# Altium schematic symbol library Capacitor.SchLib: 735 symbols (part 1 of 20)
Pins are listed as number, name and electrical type; pins without a type are passive.

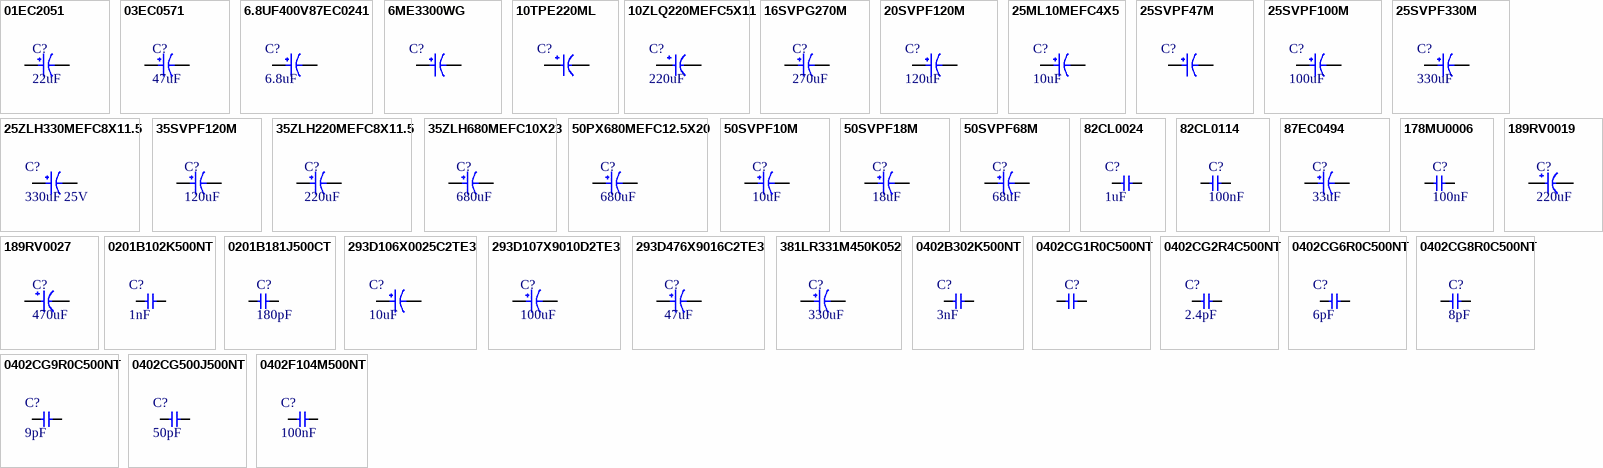
[diagram p0: symbols 01EC2051 to 0402F104M500NT]

## 01EC2051
designator C?, comment 22uF
22uF 450V 1.9Ω@100kHz ±20% 560mA@100kHz Plugin,D13xL20mm Aluminum Electrolytic Capacitors - Leaded ROHS; Manufacturer: KNSCHA; Manufacturer Part Number: 01EC2051; Package: Plugin,D13xL20mm; LCSC Part Number: C2766207; Item Type: Capacitor; ComponentLink1Description: LCSC; ComponentLink1URL: https://www.lcsc.com/product-detail/Aluminum-Electrolytic-Capacitors-Leaded_KNSCHA-01EC2051_C2766207.html
footprint 01EC2051
pins: 1, 2

## 03EC0571
designator C?, comment 47uF
47uF 50V ±20% 180mA@100kHz Plugin,D6.3xL12mm Aluminum Electrolytic Capacitors - Leaded ROHS; Manufacturer: KNSCHA; Manufacturer Part Number: 03EC0571; Package: Plugin,D6.3xL12mm; LCSC Part Number: C2831773; Item Type: Capacitor; ComponentLink1Description: LCSC; ComponentLink1URL: https://www.lcsc.com/product-detail/Aluminum-Electrolytic-Capacitors-Leaded_KNSCHA-03EC0571_C2831773.html
footprint Plugin,D6.3xL12mm
pins: 1, 2

## 6.8UF400V87EC0241
designator C?, comment 6.8uF
6.8uF 400V ±20% 118mA@100kHz Plugin,D8xL9mm Aluminum Electrolytic Capacitors - Leaded ROHS; Manufacturer: KNSCHA; Manufacturer Part Number: 6.8UF400V87EC0241; Package: Plugin,D8xL9mm; LCSC Part Number: C2803208; Item Type: Electrolytic Capacitor; ComponentLink1Description: LCSC; ComponentLink1URL: https://www.lcsc.com/product-detail/Aluminum-Electrolytic-Capacitors-Leaded_KNSCHA-6-8UF400V87EC0241_C2803208.html
footprint 6.8UF400V87EC0241
pins: 1, 2

## 6ME3300WG
designator C?
3300uF 6.3V ±20% Plugin,D10xL23mm Aluminum Electrolytic Capacitors - Leaded ROHS; Manufacturer: SUNCON(SUN Elec Industries); Manufacturer Part Number: 6ME3300WG; Package: Plugin,D10xL23mm; LCSC Part Number: C242095; Item Type: Capacitors; ComponentLink1Description: LCSC; ComponentLink1URL: https://www.lcsc.com/product-detail/Aluminum-Electrolytic-Capacitors-Leaded_SUNCON-SUN-Elec-Industries-6ME3300WG_C242095.html
footprint 6ME3300WG
pins: 1, 2

## 10TPE220ML
designator C?
CAP TANT POLY 220UF 10V 2917; Manufacturer: Panasonic; Manufacturer Part Number: 10TPE220ML; Item Type: Capacitors; Material: Polymer; Tolerance: 20%; Leakage Current: 220uA; Polarity: Polar; ESR (Equivalent Series Resistance): 25mR; Ripple Current: 2.4A; Dissipation Factor: 10%; Life (Hours): 2000Hour; Supplier: Mouser; LCSC Part Number: C147767; RoHS: Yes; Stock: 2855; Pricing: 1=2.48, 10=1.58, 50=1.26, 100=1.25, 1000=0.99, 10000=0.855 (USD); Mounting Technology: Surface Mount; Case/Package: 2917; Case Code (Metric): 7343; Case Code (Imperial): 2917; Min Operating Temperature: -55°C; Max Operating Temperature: 105°C; Value: 220uF; Packaging: Tape and Reel; Voltage Rating: 10V; Package Quantity: 1; Voltage Rating (DC): 10V; Termination: SMD/SMT; Voltage: 10V; Features: General Purpose; Series: POSCAP™ TPE; Construction: Flat; Length: 7.3mm; Width: 4.3mm; Height: 2.8mm; Height - Seated (Max): 0.118inch; Depth: 4.3mm; Radiation Hardening: No; Reach SVHC Compliant: No; Lead Free: Lead Free; RoHS Compliant: Yes; ComponentLink1URL: https://datasheet.ciiva.com/26937/getdatasheetpartid-743678-26937139.pdf?src-supplier=Verical; ComponentLink1Description: https://datasheet.ciiva.com/26937/getdatasheetpartid-743678-26937139.pdf?src-supplier=Verical; ComponentLink2URL: https://datasheet.ciiva.com/48543/tpe-series-eng-tds-48543125.pdf?src-supplier=Distrelec; ComponentLink2Description: https://datasheet.ciiva.com/48543/tpe-series-eng-tds-48543125.pdf?src-supplier=Distrelec; ComponentLink3URL: https://datasheet.ciiva.com/25784/1734363-25784797.pdf?src-supplier=Farnell; ComponentLink3Description: https://datasheet.ciiva.com/25784/1734363-25784797.pdf?src-supplier=Farnell; ComponentLink4URL: https://datasheet.ciiva.com/24094/tpe-os-262406-24094270.pdf?src-supplier=Mouser; ComponentLink4Description: https://datasheet.ciiva.com/24094/tpe-os-262406-24094270.pdf?src-supplier=Mouser
footprint Case-E
pins: 1, 2

## 10ZLQ220MEFC5X11
designator C?, comment 220uF
220uF 10V ±20% Plugin,D5xL11mm Aluminum Electrolytic Capacitors - Leaded ROHS; Manufacturer: Rubycon; Manufacturer Part Number: 10ZLQ220MEFC5X11; Package: Plugin,D5xL11mm; LCSC Part Number: C694058; Item Type: Capacitor; ComponentLink1Description: LCSC; ComponentLink1URL: https://www.lcsc.com/product-detail/Aluminum-Electrolytic-Capacitors-Leaded_Rubycon-10ZLQ220MEFC5X11_C694058.html
footprint 10ZLQ220MEFC5X11
pins: 1, 2

## 16SVPG270M
designator C?, comment 270uF
CAP ALUM POLY 270UF 20% 16V SMD; Manufacturer: Panasonic; Manufacturer Part Number: 16SVPG270M; Item Type: Capacitors; Dielectric Material: Aluminium; Material: 4242ConductorMaterial; ESR (Equivalent Series Resistance): 8mR; Life (Hours): 5000Hour; Voltage: 24V; Leakage Current: 864uA; Dissipation Factor: 12%; Supplier: Arrow Electronics; LCSC Part Number: C178351; RoHS: Yes; Stock: 18500; Pricing: 500=0.5687, 1000=0.54, 2500=0.5149, 5000=0.5016, 10000=0.4827 (USD); Mounting Technology: Surface Mount; Case/Package: Radial; Pins: 10; Min Operating Temperature: -55°C; Max Operating Temperature: 105°C; Packaging: Tape and Reel; Voltage Rating: 16V; Tolerance: 20%; Value: 270uF; Series: SVPG; Package Quantity: 500; Termination: SMD/SMT; Voltage Rating (DC): 16V; Diameter: 6.3mm; Length: 9.9mm; Width: 6.6mm; Height: 6.6mm; Lead Pitch: 2.1mm; RoHS Compliant: Yes; Reach SVHC Compliant: No; Lead Free: Lead Free; ComponentLink1URL: http://www.farnell.com/datasheets/2579260.pdf?src-supplier=Farnell; ComponentLink1Description: http://www.farnell.com/datasheets/2579260.pdf?src-supplier=Farnell; ComponentLink2URL: http://industrial.panasonic.com/www-data/pdf/AAB8000/AAB8000CE14.pdf?src-supplier=Avnet; ComponentLink2Description: http://industrial.panasonic.com/www-data/pdf/AAB8000/AAB8000CE14.pdf?src-supplier=Avnet; ComponentLink3URL: http://industrial.panasonic.com/cdbs/www-data/pdf/AAB8000/AAB8000C175.pdf?src-supplier=Farnell; ComponentLink3Description: http://industrial.panasonic.com/cdbs/www-data/pdf/AAB8000/AAB8000C175.pdf?src-supplier=Farnell; ComponentLink4URL: http://www.farnell.com/datasheets/1950075.pdf?src-supplier=Element14; ComponentLink4Description: http://www.farnell.com/datasheets/1950075.pdf?src-supplier=Element14; ComponentLink5URL: https://datasheet.octopart.com/16SVPG270M-Panasonic-datasheet-138704366.pdf?src-supplier=TME; ComponentLink5Description: https://datasheet.octopart.com/16SVPG270M-Panasonic-datasheet-138704366.pdf?src-supplier=TME; ComponentLink6URL: https://datasheet.octopart.com/16SVPG270M-Panasonic-datasheet-151609408.pdf?src-supplier=Master+Electronics; ComponentLink6Description: https://datasheet.octopart.com/16SVPG270M-Panasonic-datasheet-151609408.pdf?src-supplier=Master+Electronics
footprint 16SVPG270M
pins: 1, 2

## 20SVPF120M
designator C?, comment 120uF
CAP ALUM POLY 120UF 20% 20V SMD; Manufacturer: Panasonic; Manufacturer Part Number: 20SVPF120M; Material: Polymer; ESR (Equivalent Series Resistance): 25mR; Ripple Current: 3.2A; Leakage Current: 480uA; Polarity: Polar; Life (Hours): 5000Hour; Dissipation Factor: 12%; Item Type: Capacitor; Supplier 1: Digi-Key; RoHS: Yes; Category: Aluminum Electrolytic Capacitors; Stock 1: 50150; Pricing 1: 1=1.45000, 10=1.14300, 50=0.99020, 100=0.85700, 500=0.64748 (USD); Mount: Surface Mount; Case/Package: Radial; Number of Pins: 6; Min Operating Temperature: -55°C; Max Operating Temperature: 105°C; Capacitance: 120uF; Tolerance: 20%; Voltage Rating: 20V; Packaging: Tape and Reel; Voltage Rating (DC): 20V; Package Quantity: 1000; Ripple Current (AC): 3.2A; Termination: SMD/SMT; Voltage: 20V; Series: OS-CON™, SVPF; Construction: Cylindrical; Diameter: 6.3mm; Length: 5.9mm; Height: 5.9mm; Height - Seated (Max): 0.236inch; Radiation Hardening: No; Reach SVHC Compliant: Yes; Lead Free: Lead Free; RoHS Compliant: Yes; ComponentLink1URL: https://datasheet.ciiva.com/24432/svpf-series-datasheet-24432811.pdf?src-supplier=Onlinecomponents.com; ComponentLink1Description: https://datasheet.ciiva.com/24432/svpf-series-datasheet-24432811.pdf?src-supplier=Onlinecomponents.com; ComponentLink2URL: https://datasheet.ciiva.com/25746/1734360-25746680.pdf?src-supplier=Farnell; ComponentLink2Description: https://datasheet.ciiva.com/25746/1734360-25746680.pdf?src-supplier=Farnell; ComponentLink3URL: https://datasheet.ciiva.com/22746/1734360-22746206.pdf?src-supplier=Element14; ComponentLink3Description: https://datasheet.ciiva.com/22746/1734360-22746206.pdf?src-supplier=Element14; ComponentLink4URL: https://datasheet.ciiva.com/46650/70324301-46650876.pdf?src-supplier=Allied+Electronics; ComponentLink4Description: https://datasheet.ciiva.com/46650/70324301-46650876.pdf?src-supplier=Allied+Electronics; Supplier Part Number 1: P16498CT-ND; LCSC Part Number: C186713
footprint 20SVPF120M
pins: 1, 2

## 25ML10MEFC4X5
designator C?, comment 10uF
10uF 25V ±20% 18mA@120Hz Plugin,D4xL5mm Aluminum Electrolytic Capacitors - Leaded ROHS; Manufacturer: Rubycon; Manufacturer Part Number: 25ML10MEFC4X5; Package: Plugin,D4xL5mm; LCSC Part Number: C473157; Item Type: Capacitor; ComponentLink1Description: LCSC; ComponentLink1URL: https://www.lcsc.com/product-detail/Aluminum-Electrolytic-Capacitors-Leaded_Rubycon-25ML10MEFC4X5_C473157.html
footprint 25ML10MEFC4X5
pins: 1, 2

## 25SVPF47M
designator C?
CAP ALUM POLY 47UF 20% 25V SMD; Manufacturer: Panasonic; Manufacturer Part Number: 25SVPF47M; Dielectric Material: Aluminium; Polarity: Polarized; ESR (Equivalent Series Resistance): 30mR; Leakage Current: 235uA; Ripple Current: 140mA; Tan Delta: 0.12; Item Type: Capacitor; Supplier 1: Avnet; RoHS: Yes; Category: Polymer Capacitors; Stock 1: 1000; Pricing 1: 1000=0.43572, 2000=0.42658, 4000=0.41744, 6000=0.40830, 8000=0.39916 (USD); Mounting Technology: Surface Mount; Pins: 2; Package Shape: Cylindrical; Case/Package: 2626; Min Operating Temperature: -55°C; Max Operating Temperature: 105°C; Value: 47uF; Capacitor Type: Aluminium; Tolerance  (fill in as +-): 20%; Package Style: SMTMeter; Packaging: Tape and Reel; Tolerance (fill in as +-): 20%; Rated DC Voltage (URdc): 25V; Termination: Flat; Length: 7.3mm; Width: 6.6mm; Height: 5.9mm; Reach SVHC Compliant: Yes; RoHS Compliant: Yes; ComponentLink1URL: https://datasheet.ciiva.com:443/pdfs/VipMasterIC/IC/PANA/PANA-S-A0008969958/PANA-S-A0008969958-1.pdf?src-supplier=IHS+Markit; ComponentLink1Description: https://datasheet.ciiva.com:443/pdfs/VipMasterIC/IC/PANA/PANA-S-A0008969958/PANA-S-A0008969958-1.pdf?src-supplier=IHS+Markit; ComponentLink2URL: https://datasheet.ciiva.com/48542/svpf-eng-ds-48542390.pdf?src-supplier=Distrelec; ComponentLink2Description: https://datasheet.ciiva.com/48542/svpf-eng-ds-48542390.pdf?src-supplier=Distrelec; ComponentLink3URL: https://datasheet.ciiva.com/25746/1734360-25746558.pdf?src-supplier=Farnell; ComponentLink3Description: https://datasheet.ciiva.com/25746/1734360-25746558.pdf?src-supplier=Farnell; ComponentLink4URL: https://datasheet.ciiva.com/22746/1734360-22746218.pdf?src-supplier=Element14; ComponentLink4Description: https://datasheet.ciiva.com/22746/1734360-22746218.pdf?src-supplier=Element14; ComponentLink5URL: https://datasheet.ciiva.com/24025/svpf-os-262415-24025725.pdf?src-supplier=Mouser; ComponentLink5Description: https://datasheet.ciiva.com/24025/svpf-os-262415-24025725.pdf?src-supplier=Mouser; Supplier Part Number 1: 25SVPF47M; LCSC Part Number: C136280
footprint 25SVPF47M
pins: 1, 2

## 25SVPF100M
designator C?, comment 100uF
CAP ALUM POLY 100UF 20% 25V SMD; Manufacturer: Panasonic; Manufacturer Part Number: 25SVPF100M; Ripple Current: 3.2A; ESR (Equivalent Series Resistance): 24mR; Leakage Current: 500uA; Life (Hours): 5000Hour; Dissipation Factor: 12%; Item Type: Capacitor; Supplier 1: Digi-Key; RoHS: Yes; Category: Aluminum Electrolytic Capacitors; Stock 1: 5809; Pricing 1: 1=1.68000, 10=1.32800, 50=1.15080, 100=0.99590, 500=0.75246 (USD); Mount: Surface Mount; Case/Package: Radial; Number of Pins: 7; Min Operating Temperature: -55°C; Max Operating Temperature: 105°C; Capacitance: 100uF; Tolerance: 20%; Voltage Rating: 25V; Ripple Current (AC): 3.2A; Packaging: Tape and Reel; Package Quantity: 1000; Voltage Rating (DC): 25V; Termination: SMD/SMT; Voltage: 25V; Series: OS-CON, SVPF; Diameter: 8mm; Length: 6.9mm; Height: 6.9mm; Height - Seated (Max): 0.276inch; Reach SVHC Compliant: Yes; Lead Free: Lead Free; RoHS Compliant: Yes; ComponentLink1URL: https://datasheet.ciiva.com/25746/1734360-25746518.pdf?src-supplier=Farnell; ComponentLink1Description: https://datasheet.ciiva.com/25746/1734360-25746518.pdf?src-supplier=Farnell; ComponentLink2URL: https://datasheet.ciiva.com/22746/1734360-22746213.pdf?src-supplier=Element14; ComponentLink2Description: https://datasheet.ciiva.com/22746/1734360-22746213.pdf?src-supplier=Element14; ComponentLink3URL: https://datasheet.ciiva.com/24064/svpf-os-262415-24064540.pdf?src-supplier=Mouser; ComponentLink3Description: https://datasheet.ciiva.com/24064/svpf-os-262415-24064540.pdf?src-supplier=Mouser; Supplier Part Number 1: P123675CT-ND; LCSC Part Number: C136279
footprint 25SVPF100M.
pins: 1, 2

## 25SVPF330M
designator C?, comment 330uF
CAP ALUM POLY 330UF 20% 25V SMD; Manufacturer: Panasonic; Manufacturer Part Number: 25SVPF330M; Ripple Current: 5A; Life (Hours): 5000Hour; ESR (Equivalent Series Resistance): 14mR; Polarity: Polar; Leakage Current: 1.65mA; Dissipation Factor: 12%; Item Type: Capacitor; Supplier 1: Avnet; RoHS: Yes; Category: Polymer Capacitors; Stock 1: 680; Pricing 1: 1=2.46000, 10=2.01000, 25=1.86000, 50=1.72000, 100=1.57000, 250=1.54000 (USD); Mount: Surface Mount; Case/Package: Radial; Number of Pins: 12; Min Operating Temperature: -55°C; Max Operating Temperature: 105°C; Tolerance: 20%; Packaging: Tape and Reel; Package Quantity: 400; Capacitance: 330uF; Voltage Rating: 25V; Voltage Rating (DC): 25V; Termination: SMD/SMT; Voltage: 25V; Series: OS-CON™, SVPF; Construction: Cylindrical; Ripple Current (AC): 5A; Diameter: 10mm; Length: 12.6mm; Height: 12.6mm; Height - Seated (Max): 0.5inch; Reach SVHC Compliant: Yes; Lead Free: Lead Free; RoHS Compliant: Yes; ComponentLink1URL: https://datasheet.ciiva.com/48542/svpf-eng-ds-48542398.pdf?src-supplier=Distrelec; ComponentLink1Description: https://datasheet.ciiva.com/48542/svpf-eng-ds-48542398.pdf?src-supplier=Distrelec; ComponentLink2URL: https://datasheet.ciiva.com/22746/1734360-22746217.pdf?src-supplier=Element14; ComponentLink2Description: https://datasheet.ciiva.com/22746/1734360-22746217.pdf?src-supplier=Element14; ComponentLink3URL: https://datasheet.ciiva.com/24216/svpf-os-262415-24216060.pdf?src-supplier=Mouser; ComponentLink3Description: https://datasheet.ciiva.com/24216/svpf-os-262415-24216060.pdf?src-supplier=Mouser; ComponentLink4URL: https://datasheet.ciiva.com/46650/70324301-46650266.pdf?src-supplier=Allied+Electronics; ComponentLink4Description: https://datasheet.ciiva.com/46650/70324301-46650266.pdf?src-supplier=Allied+Electronics; Supplier Part Number 1: 68AC5716; LCSC Part Number: C178367
footprint 25SVPF330M
pins: 1, 2

## 25ZLH330MEFC8X11.5
designator C?, comment 330uF 25V
330uF 25V 56mΩ@100kHz ±20% 945mA@100kHz Plugin,D8xL11.5mm Aluminum Electrolytic Capacitors - Leaded ROHS; Manufacturer: Rubycon; Manufacturer Part Number: 25ZLH330MEFC8X11.5; ComponentLink1URL: https://www.lcsc.com/product-detail/Aluminum-Electrolytic-Capacitors-Leaded_Rubycon-25ZLH330MEFC8X11-5_C109394.html; ComponentLink1Description: LCSC; JLCPCB Part Number: C109394; Item Type: Capacitor; Package: Plugin,D8xL11.5mm
footprint Plugin,D8xL11.5mm
pins: 1, 2

## 35SVPF120M
designator C?, comment 120uF
CAP ALUM POLY 120UF 20% 35V SMD; Manufacturer: Panasonic; Manufacturer Part Number: 35SVPF120M; Item Type: Capacitors; Material: 4242ConductorMaterial; Supplier: Mouser; LCSC Part Number: C501341; RoHS: Yes; Stock: 2; Pricing: 1=2.52, 10=1.63, 50=1.35, 100=1.2, 1000=0.933, 10000=0.829 (USD); Lead Free: 5697LeadFree; ComponentLink1URL: https://datasheet.ciiva.com/22746/1734360-22746250.pdf?src-supplier=Element14; ComponentLink1Description: https://datasheet.ciiva.com/22746/1734360-22746250.pdf?src-supplier=Element14; ComponentLink2URL: https://datasheet.ciiva.com/49032/70324301-49032503.pdf?src-supplier=Allied+Electronics; ComponentLink2Description: https://datasheet.ciiva.com/49032/70324301-49032503.pdf?src-supplier=Allied+Electronics; ComponentLink3URL: https://datasheet.ciiva.com/48542/svpf-eng-ds-48542424.pdf?src-supplier=Distrelec; ComponentLink3Description: https://datasheet.ciiva.com/48542/svpf-eng-ds-48542424.pdf?src-supplier=Distrelec; ComponentLink4URL: https://datasheet.ciiva.com/24094/svpf-os-262415-24094351.pdf?src-supplier=Mouser; ComponentLink4Description: https://datasheet.ciiva.com/24094/svpf-os-262415-24094351.pdf?src-supplier=Mouser; ComponentLink5URL: https://datasheet.ciiva.com/25761/1734360-25761535.pdf?src-supplier=Farnell; ComponentLink5Description: https://datasheet.ciiva.com/25761/1734360-25761535.pdf?src-supplier=Farnell
footprint 35SVPF120M
pins: 1, 2

## 35ZLH220MEFC8X11.5
designator C?, comment 220uF
220uF 35V 472.5mA@120Hz ±20% Plugin,D8xL11.5mm Aluminum Electrolytic Capacitors - Leaded ROHS; Manufacturer: Rubycon; Manufacturer Part Number: 35ZLH220MEFC8X11.5; Package: Plugin,D8xL11.5mm; LCSC Part Number: C107639; Item Type: Capacitor; ComponentLink1Description: LCSC; ComponentLink1URL: https://www.lcsc.com/product-detail/Aluminum-Electrolytic-Capacitors-Leaded_Rubycon-35ZLH220MEFC8X11-5_C107639.html?s_z=n_EKZE350ELL221MJC5S
footprint 35ZLH220MEFC8X11.5
pins: 1, 2

## 35ZLH680MEFC10X23
designator C?, comment 680uF
CAP ALUM 680UF 20% 35V RADIAL; Manufacturer: Rubycon; Manufacturer Part Number: 35ZLH680MEFC10X23; Dielectric Material: Aluminium; Ripple Current: 2.25A; Life (Hours): 10000Hour; Impedance: 18mR; Leakage Current: 3uA; Lead Diameter: 0.6mm; Item Type: Capacitor; Supplier: Rs; Supplier Part Number: 7037560P; RoHS: Yes; Category: Aluminum Electrolytic Capacitors; Stock: 1580; Pricing: 50=0.41, 250=0.286, 500=0.278, 1000=0.272 (GBP); Mounting Technology: Through Hole; Case/Package: Radial; Pins: 2; Min Operating Temperature: -40°C; Max Operating Temperature: 105°C; Value: 680uF; Tolerance: 20%; Termination: Radial; Packaging: Bulk; Voltage Rating: 35V; Ripple Current (AC): 2.25A; Voltage Rating (DC): 35V; Voltage: 35V; Series: ZLH; Construction: RADIAL; Diameter: 10mm; Height: 23mm; Lead Pitch: 5mm; Radiation Hardening: No; Reach SVHC Compliant: No; Lead Free: Lead Free; RoHS Compliant: Yes; ComponentLink1URL: https://datasheet.ciiva.com/11780/0900766b80e2f602-11780988.pdf?src-supplier=Rs; ComponentLink1Description: https://datasheet.ciiva.com/11780/0900766b80e2f602-11780988.pdf?src-supplier=Rs; ComponentLink2URL: https://datasheet.ciiva.com/11691/e-zlh-11691224.pdf?src-supplier=Avnet; ComponentLink2Description: https://datasheet.ciiva.com/11691/e-zlh-11691224.pdf?src-supplier=Avnet; ComponentLink3URL: https://datasheet.ciiva.com/1456/50911-1456226.pdf?src-supplier=Element14; ComponentLink3Description: https://datasheet.ciiva.com/1456/50911-1456226.pdf?src-supplier=Element14
footprint 35ZLH680MEFC10X23
pins: 1, 2

## 50PX680MEFC12.5X20
designator C?, comment 680uF
CAP ALUM 680UF 20% 50V RADIAL; Manufacturer: Rubycon; Manufacturer Part Number: 50PX680MEFC12.5X20; Ripple Current (AC): 980mA; Item Type: Capacitor; Supplier: Digikey; Supplier Part Number: 1189-1409-ND; RoHS: Yes; Category: Aluminum Electrolytic Capacitors; Stock: 6533; Pricing: 1=0.99, 10=0.625, 50=0.4704, 100=0.422, 500=0.3404, 1000=0.31546, 3000=0.28945, 5000=0.27403 (USD); Mounting Technology: Through Hole; Case/Package: Radial; Pins: 2; Min Operating Temperature: -55°C; Max Operating Temperature: 105°C; Tolerance: 20%; Value: 680uF; Voltage Rating: 50V; Packaging: Bulk; Voltage Rating (DC): 50V; Series: PX; Diameter: 12.5mm; Height: 20mm; Lead Pitch: 5mm; Reach SVHC Compliant: No; RoHS Compliant: Yes; ComponentLink1URL: https://datasheet.ciiva.com/6327/e-px-6327166.pdf?src-supplier=Digikey; ComponentLink1Description: https://datasheet.ciiva.com/6327/e-px-6327166.pdf?src-supplier=Digikey
footprint 50PX680MEFC12.5X20
pins: 1, 2

## 50SVPF10M
designator C?, comment 10uF
CAP ALUM POLY 10UF 20% 50V SMD; Manufacturer: Panasonic; Manufacturer Part Number: 50SVPF10M; Material: 4242ConductorMaterial; Item Type: Capacitor; Supplier: Mouser; Supplier Part Number: 667-50SVPF10M; RoHS: Yes; Category: Polymer Capacitors; Stock: 29802; Pricing: 1=1.12, 10=0.801, 50=0.801, 100=0.665, 1000=0.555, 10000=0.504 (USD); ComponentLink1URL: https://datasheet.ciiva.com/48542/svpf-eng-ds-48542427.pdf?src-supplier=Distrelec; ComponentLink1Description: https://datasheet.ciiva.com/48542/svpf-eng-ds-48542427.pdf?src-supplier=Distrelec; ComponentLink2URL: https://datasheet.ciiva.com/24216/svpf-os-262415-24216043.pdf?src-supplier=Mouser; ComponentLink2Description: https://datasheet.ciiva.com/24216/svpf-os-262415-24216043.pdf?src-supplier=Mouser; ComponentLink3URL: https://datasheet.ciiva.com/25761/1734360-25761263.pdf?src-supplier=Farnell; ComponentLink3Description: https://datasheet.ciiva.com/25761/1734360-25761263.pdf?src-supplier=Farnell; LCSC Part Number: C2162323
footprint 50SVPF10M
pins: 1, 2

## 50SVPF18M
designator C?, comment 18uF
CAP ALUM POLY 18UF 20% 50V SMD; Manufacturer: Panasonic; Manufacturer Part Number: 50SVPF18M; Item Type: Capacitors; Supplier: Mouser; LCSC Part Number: C178374; RoHS: Yes; Stock: 2258; Pricing: 1=1.44, 10=0.995, 50=0.995, 100=0.799, 1000=0.562, 10000=0.498 (USD); ComponentLink1URL: https://datasheet.ciiva.com/24033/svpf-os-262415-24033818.pdf?src-supplier=Mouser; ComponentLink1Description: https://datasheet.ciiva.com/24033/svpf-os-262415-24033818.pdf?src-supplier=Mouser; ComponentLink2URL: https://datasheet.ciiva.com/25761/1734360-25761272.pdf?src-supplier=Farnell; ComponentLink2Description: https://datasheet.ciiva.com/25761/1734360-25761272.pdf?src-supplier=Farnell; ComponentLink3URL: https://datasheet.ciiva.com/48542/svpf-eng-ds-48542431.pdf?src-supplier=Distrelec; ComponentLink3Description: https://datasheet.ciiva.com/48542/svpf-eng-ds-48542431.pdf?src-supplier=Distrelec; ComponentLink4URL: https://datasheet.ciiva.com/22746/1734360-22746277.pdf?src-supplier=Element14; ComponentLink4Description: https://datasheet.ciiva.com/22746/1734360-22746277.pdf?src-supplier=Element14
footprint 50SVPF18M
pins: 1, 2

## 50SVPF68M
designator C?, comment 68uF
CAP ALUM POLY 68UF 20% 50V SMD; Manufacturer: Panasonic; Manufacturer Part Number: 50SVPF68M; Item Type: Capacitors; Material: 4242ConductorMaterial; Supplier: Future Electronics; LCSC Part Number: C178375; RoHS: Yes; Stock: 8800; Pricing: 400=1.08, 800=1.05, 1200=1.03, 1600=1.02, 2000=0.985 (USD); ComponentLink1URL: https://datasheet.ciiva.com/25761/1734360-25761295.pdf?src-supplier=Farnell; ComponentLink1Description: https://datasheet.ciiva.com/25761/1734360-25761295.pdf?src-supplier=Farnell; ComponentLink2URL: https://datasheet.ciiva.com/24071/svpf-os-262415-24071528.pdf?src-supplier=Mouser; ComponentLink2Description: https://datasheet.ciiva.com/24071/svpf-os-262415-24071528.pdf?src-supplier=Mouser; ComponentLink3URL: https://datasheet.ciiva.com/22746/1734360-22746280.pdf?src-supplier=Element14; ComponentLink3Description: https://datasheet.ciiva.com/22746/1734360-22746280.pdf?src-supplier=Element14
footprint 50SVPF68M
pins: 1, 2

## 82CL0024
designator C?, comment 1uF
±5% 100V 1uF -55℃~+110℃ Metallized Polyester Plugin,P=5mm Film Capacitors ROHS; Manufacturer: KNSCHA; Manufacturer Part Number: 82CL0024; Package: Plugin,P=5mm; LCSC Part Number: C5359313; Item Type: Capacitor; ComponentLink1Description: LCSC; ComponentLink1URL: https://www.lcsc.com/product-detail/Film-Capacitors_KNSCHA-82CL0024_C5359313.html
footprint 82CL0024
pins: 1, 2

## 82CL0114
designator C?, comment 100nF
5% 400V 100nF PET Plugin,P=7.5mm Film Capacitors ROHS; Manufacturer: KNSCHA; Manufacturer Part Number: 82CL0114; Package: Plugin,P=7.5mm; LCSC Part Number: C5359295; ComponentLink1Description: LCSC; ComponentLink1URL: https://www.lcsc.com/product-detail/Film-Capacitors_KNSCHA-82CL0114_C5359295.html
footprint 82CL0114
pins: 1, 2

## 87EC0494
designator C?, comment 33uF
33uF 420V 1Ω@100kHz 430mA@100kHz ±20% Plugin,D10xL16mm Aluminum Electrolytic Capacitors - Leaded ROHS; Manufacturer: KNSCHA; Manufacturer Part Number: 87EC0494; Package: Plugin,D10xL16mm; LCSC Part Number: C6718366; Item Type: Capacitor; ComponentLink1Description: LCSC; ComponentLink1URL: https://www.lcsc.com/product-detail/Aluminum-Electrolytic-Capacitors-Leaded_KNSCHA-87EC0494_C6718366.html
footprint 87EC0494
pins: 1, 2

## 178MU0006
designator C?, comment 100nF
10% 50V 100nF X7R Plugin,P=2.54mm Multilayer Ceramic Capacitors MLCC - Leaded ROHS; Manufacturer: KNSCHA; Manufacturer Part Number: 178MU0006; Package: Plugin,P=2.54mm; LCSC Part Number: C5632430; Item Type: Capacitor; ComponentLink1Description: LCSC; ComponentLink1URL: https://www.lcsc.com/product-detail/Multilayer-Ceramic-Capacitors-MLCC-Leaded_KNSCHA-178MU0006_C5632430.html
footprint 178MU0006
pins: 1, 2

## 189RV0019
designator C?, comment 220uF
220uF 35V 600mA@100KHz 160mΩ@100KHz ±20% SMD,D6.3xL7.7mm Aluminum Electrolytic Capacitors - SMD ROHS; Manufacturer: KNSCHA; Manufacturer Part Number: 189RV0019; Package: SMD,D6.3xL7.7mm; LCSC Part Number: C7471881; Item Type: Capacitors; ComponentLink1Description: LCSC; ComponentLink1URL: https://www.lcsc.com/product-detail/Aluminum-Electrolytic-Capacitors-SMD_KNSCHA-189RV0019_C7471881.html
footprint 189RV0019
pins: 1, 2

## 189RV0027
designator C?, comment 470uF
470uF 35V 850mA@100KHz 80mΩ@100KHz ±20% SMD,D8xL10.5mm Aluminum Electrolytic Capacitors - SMD ROHS; Manufacturer: KNSCHA; Manufacturer Part Number: 189RV0027; Package: SMD,D8xL10.5mm; LCSC Part Number: C7471889; Item Type: Capacitors; ComponentLink1Description: LCSC; ComponentLink1URL: https://www.lcsc.com/product-detail/Aluminum-Electrolytic-Capacitors-SMD_KNSCHA-189RV0027_C7471889.html
footprint 189RV0027
pins: 1, 2

## 0201B102K500NT
designator C?, comment 1nF
50V 1nF X7R ±10% 0201 Multilayer Ceramic Capacitors MLCC - SMD/SMT ROHS; Manufacturer: FH; Manufacturer Part Number: 0201B102K500NT; LCSC Part Number: C66942; Item Type: Capacitor; ComponentLink1Description: LCSC; ComponentLink1URL: https://www.lcsc.com/product-detail/Multilayer-Ceramic-Capacitors-MLCC-SMD-SMT_FH-Guangdong-Fenghua-Advanced-Tech-0201B102K500NT_C66942.html; Value: 1nF
footprint CAP-0201
pins: 1, 2

## 0201B181J500CT
designator C?, comment 180pF
CAP CER 180PF 50V X7R 0201; Manufacturer: Walsin Technologies; Manufacturer Part Number: 0201B181J500CT; Item Type: Capacitor; Supplier: Digikey; Supplier Part Number: 1292-0201B181J500CTTR-ND; RoHS: Yes; Category: Ceramic Capacitors; Pricing: 15000=0.0101 (USD); RoHS Compliant: Yes; LCSC Part Number: C458606
footprint CAP-0201
pins: 1, 2

## 293D106X0025C2TE3
designator C?, comment 10uF
Cap Tant Solid 10uF 25V C CASE 20% (6 X 3.2 X 2.5mm) Inward L SMD 6032-28 1.5 Ohm 125 T/R; Manufacturer: Vishay Sprague; Manufacturer Part Number: 293D106X0025C2TE3; Dielectric Material: Tantalum; ESR (Equivalent Series Resistance): 1.5R; Ripple Current: 190mA; Leakage Current: 2.5uA; Polarity: Polar; Dissipation Factor: 6%; Item Type: Capacitor; Supplier: Digikey; Supplier Part Number: 718-1044-1-ND; RoHS: Yes; Category: Tantalum Capacitors; Stock: 96032; Pricing: 1=0.53, 10=0.354, 50=0.2816, 100=0.2326 (USD); Mounting Technology: Surface Mount,PCB; Case/Package: 2412; Pins: 2; Case Code (Metric): 6032; Case Code (Imperial): 2312; Min Operating Temperature: -55°C; Max Operating Temperature: 125°C; Package Quantity: 1; Value: 10uF; Voltage Rating: 25V; Tolerance: 20%; Packaging: Tape and Reel; Voltage Rating (DC): 25V; Termination: SMD/SMT; Features: General Purpose; Series: TANTAMOUNT® 293D; Construction: Flat; Length: 6mm; Width: 0.126inch; Height: 2.5mm; Height - Seated (Max): 0.11inch; Depth: 3.2mm; Radiation Hardening: No; Lead Free: Lead Free; RoHS Compliant: Yes; Reach SVHC Compliant: Unknown; ComponentLink1URL: https://datasheet.ciiva.com/258/293d-258834.pdf?src-supplier=Digikey; ComponentLink1Description: https://datasheet.ciiva.com/258/293d-258834.pdf?src-supplier=Digikey; ComponentLink2URL: https://datasheet.ciiva.com/258/293d-258835.pdf?src-supplier=Digikey; ComponentLink2Description: https://datasheet.ciiva.com/258/293d-258835.pdf?src-supplier=Digikey; ComponentLink3URL: https://datasheet.ciiva.com/258/293d-258836.pdf?src-supplier=Digikey; ComponentLink3Description: https://datasheet.ciiva.com/258/293d-258836.pdf?src-supplier=Digikey; ComponentLink4URL: https://datasheet.ciiva.com/3003/293d-3003820.pdf?src-supplier=Avnet; ComponentLink4Description: https://datasheet.ciiva.com/3003/293d-3003820.pdf?src-supplier=Avnet; ComponentLink5URL: https://datasheet.ciiva.com/11244/293d-11244094.pdf?src-supplier=Avnet; ComponentLink5Description: https://datasheet.ciiva.com/11244/293d-11244094.pdf?src-supplier=Avnet; Package: Case-C; LCSC Part Number: C506622
footprint Case-C
pins: 1, 2

## 293D107X9010D2TE3
designator C?, comment 100uF
CAP TANT 100UF 10% 10V 2917; Manufacturer: Vishay Sprague; Manufacturer Part Number: 293D107X9010D2TE3; Item Type: Capacitors; Dielectric Material: Tantalum; ESR (Equivalent Series Resistance): 600mR; Ripple Current: 350mA; Leakage Current: 10uA; Polarity: Polar; Dissipation Factor: 8%; Power Rating: 100mW; Q Factor: 8NUMBER; Supplier: Mouser; LCSC Part Number: C155463; RoHS: Yes; Stock: 119578; Pricing: 1=1.06, 10=0.468, 50=0.468, 100=0.38, 1000=0.265, 10000=0.258 (USD); Mounting Technology: Surface Mount,PCB; Case/Package: 2917; Case Code (Imperial): 2917; Case Code (Metric): 7343; Min Operating Temperature: -55°C; Max Operating Temperature: 125°C; Value: 100uF; Packaging: Tape and Reel; Tolerance: 10%; Voltage Rating: 10V; Voltage Rating (DC): 10V; Package Quantity: 500; Termination: SMD/SMT; Voltage: 10V; Features: General Purpose; Series: TANTAMOUNT®, 293D; Construction: Flat; Length: 7.3mm; Width: 2.8mm; Height: 2.8mm; Depth: 4.3mm; Radiation Hardening: No; Lead Free: Lead Free; RoHS Compliant: Yes; Reach SVHC Compliant: Unknown; ComponentLink1URL: https://datasheet.ciiva.com/1463/438417-1463240.pdf?src-supplier=Element14; ComponentLink1Description: https://datasheet.ciiva.com/1463/438417-1463240.pdf?src-supplier=Element14; ComponentLink2URL: https://datasheet.ciiva.com/22695/438417-22695119.pdf?src-supplier=Element14; ComponentLink2Description: https://datasheet.ciiva.com/22695/438417-22695119.pdf?src-supplier=Element14; ComponentLink3URL: https://datasheet.ciiva.com/3003/293d-3003852.pdf?src-supplier=Avnet; ComponentLink3Description: https://datasheet.ciiva.com/3003/293d-3003852.pdf?src-supplier=Avnet; ComponentLink4URL: https://datasheet.ciiva.com/16366/293d-16366280.pdf?src-supplier=Future+Electronics; ComponentLink4Description: https://datasheet.ciiva.com/16366/293d-16366280.pdf?src-supplier=Future+Electronics; ComponentLink5URL: https://datasheet.ciiva.com/15163/getdatasheetpartid-87118-15163221.pdf?src-supplier=Verical; ComponentLink5Description: https://datasheet.ciiva.com/15163/getdatasheetpartid-87118-15163221.pdf?src-supplier=Verical
footprint Case-D
pins: 1, 2

## 293D476X9016C2TE3
designator C?, comment 47uF
CAP TANT 47UF 10% 16V 2312; Manufacturer: Vishay Sprague; Manufacturer Part Number: 293D476X9016C2TE3; Item Type: Capacitors; Supplier: Mouser; LCSC Part Number: C129697; RoHS: Yes; Stock: 4282; Pricing: 1=0.47, 10=0.301, 50=0.301, 100=0.262, 1000=0.188, 10000=0.188 (USD); ComponentLink1URL: https://datasheet.ciiva.com/11793/0900766b80d97b37-11793330.pdf?src-supplier=Rs; ComponentLink1Description: https://datasheet.ciiva.com/11793/0900766b80d97b37-11793330.pdf?src-supplier=Rs; ComponentLink2URL: https://datasheet.ciiva.com/16305/293d-16305383.pdf?src-supplier=Future+Electronics; ComponentLink2Description: https://datasheet.ciiva.com/16305/293d-16305383.pdf?src-supplier=Future+Electronics; ComponentLink3URL: https://datasheet.ciiva.com/22695/438417-22695173.pdf?src-supplier=Element14; ComponentLink3Description: https://datasheet.ciiva.com/22695/438417-22695173.pdf?src-supplier=Element14; ComponentLink4URL: https://datasheet.ciiva.com/3004/293d-3004007.pdf?src-supplier=Avnet; ComponentLink4Description: https://datasheet.ciiva.com/3004/293d-3004007.pdf?src-supplier=Avnet; ComponentLink5URL: https://datasheet.ciiva.com/12910/293d-239871-12910805.pdf?src-supplier=Mouser; ComponentLink5Description: https://datasheet.ciiva.com/12910/293d-239871-12910805.pdf?src-supplier=Mouser; ComponentLink6URL: https://datasheet.ciiva.com/259/293d-259267.pdf?src-supplier=Digikey; ComponentLink6Description: https://datasheet.ciiva.com/259/293d-259267.pdf?src-supplier=Digikey; ComponentLink7URL: https://datasheet.ciiva.com/259/293d-259268.pdf?src-supplier=Digikey; ComponentLink7Description: https://datasheet.ciiva.com/259/293d-259268.pdf?src-supplier=Digikey; ComponentLink8URL: https://datasheet.ciiva.com/259/293d-259269.pdf?src-supplier=Digikey; ComponentLink8Description: https://datasheet.ciiva.com/259/293d-259269.pdf?src-supplier=Digikey; ComponentLink9URL: https://datasheet.ciiva.com/18710/293d-eng-18710842.pdf?src-supplier=Distrelec; ComponentLink9Description: https://datasheet.ciiva.com/18710/293d-eng-18710842.pdf?src-supplier=Distrelec; ComponentLink10URL: https://datasheet.ciiva.com/29244/455699-da-01-en-smd-kondensator-293d476x9016c2te3-500-st-29244151.pdf?src-supplier=Conrad; ComponentLink10Description: https://datasheet.ciiva.com/29244/455699-da-01-en-smd-kondensator-293d476x9016c2te3-500-st-29244151.pdf?src-supplier=Conrad
footprint Case-C
pins: 1, 2

## 381LR331M450K052
designator C?, comment 330uF
CAP ALUM 330UF 20% 450V SNAP TH; Manufacturer: Cornell Dubilier; Manufacturer Part Number: 381LR331M450K052; Item Type: Aluminum Electrolytic Capacitors; Supplier: Digikey; RoHS: Yes; Stock: 7391; Pricing: 1=8.38, 10=5.898, 50=4.8932, 100=4.6875 (USD); ComponentLink1URL: https://datasheet.ciiva.com/101/381lr-101261.pdf?src-supplier=Digikey; ComponentLink1Description: https://datasheet.ciiva.com/101/381lr-101261.pdf?src-supplier=Digikey; ComponentLink2URL: https://datasheet.ciiva.com/5373/381lr-5373947.pdf?src-supplier=Mouser; ComponentLink2Description: https://datasheet.ciiva.com/5373/381lr-5373947.pdf?src-supplier=Mouser
footprint 381LR331M450K052
pins: 1, 2

## 0402B302K500NT
designator C?, comment 3nF
50V 3nF 0402 Multilayer Ceramic Capacitors MLCC - SMD/SMT ROHS; Manufacturer: FH (Guangdong Fenghua Advanced Tech); Manufacturer Part Number: 0402B302K500NT; Package: 0402; LCSC Part Number: C2857967; Item Type: Capacitor; ComponentLink1Description: LCSC; ComponentLink1URL: https://www.lcsc.com/product-detail/Multilayer-Ceramic-Capacitors-MLCC-SMD-SMT_FH-Guangdong-Fenghua-Advanced-Tech-0402B302K500NT_C2857967.html
footprint Cap-0402
pins: 1, 2

## 0402CG1R0C500NT
designator C?
50V 1pF C0G 0402 Multilayer Ceramic Capacitors MLCC - SMD/SMT ROHS; Manufacturer: FH (Guangdong Fenghua Advanced Tech); Manufacturer Part Number: 0402CG1R0C500NT; Package: 0402; LCSC Part Number: C1550; Item Type: Capacitor; ComponentLink1Description: LCSC; ComponentLink1URL: https://www.lcsc.com/product-detail/Multilayer-Ceramic-Capacitors-MLCC-SMD-SMT_FH-Guangdong-Fenghua-Advanced-Tech-0402CG1R0C500NT_C1550.html?s_z=n_C1550
footprint Cap-0402
pins: 1, 2

## 0402CG2R4C500NT
designator C?, comment 2.4pF
50V 2.4pF C0G 0402 Multilayer Ceramic Capacitors MLCC - SMD/SMT ROHS; Manufacturer: FH; Manufacturer Part Number: 0402CG2R4C500NT; Package: 0402; LCSC Part Number: C48346; Item Type: Capacitor; ComponentLink1Description: LCSC
footprint Cap-0402
pins: 1, 2

## 0402CG6R0C500NT
designator C?, comment 6pF
50V 6pF C0G 0402 Multilayer Ceramic Capacitors MLCC - SMD/SMT ROHS; Manufacturer: FH (Guangdong Fenghua Advanced Tech); Manufacturer Part Number: 0402CG6R0C500NT; Package: 0402; LCSC Part Number: C1575; Item Type: Capacitor; ComponentLink1Description: LCSC
footprint Cap-0402
pins: 1, 2

## 0402CG8R0C500NT
designator C?, comment 8pF
50V 8pF C0G 0402 Multilayer Ceramic Capacitors MLCC - SMD/SMT ROHS; Manufacturer: FH (Guangdong Fenghua Advanced Tech); Manufacturer Part Number: 0402CG8R0C500NT; Package: 0402; LCSC Part Number: C1578; Item Type: Capacitor; ComponentLink1Description: LCSC; ComponentLink1URL: https://www.lcsc.com/product-detail/Multilayer-Ceramic-Capacitors-MLCC-SMD-SMT_FH-Guangdong-Fenghua-Advanced-Tech-0402CG8R0C500NT_C1578.html
footprint Cap-0402
pins: 1, 2

## 0402CG9R0C500NT
designator C?, comment 9pF
50V 9pF C0G 0402 Multilayer Ceramic Capacitors MLCC - SMD/SMT ROHS; Manufacturer: FH (Guangdong Fenghua Advanced Tech); Manufacturer Part Number: 0402CG9R0C500NT; Package: 0402; LCSC Part Number: C1580; Item Type: Capacitor; ComponentLink1Description: LCSC; ComponentLink1URL: https://www.lcsc.com/product-detail/Multilayer-Ceramic-Capacitors-MLCC-SMD-SMT_FH-Guangdong-Fenghua-Advanced-Tech-0402CG9R0C500NT_C1580.html
footprint Cap-0402
pins: 1, 2

## 0402CG500J500NT
designator C?, comment 50pF
50V 50pF C0G ±5% 0402 Multilayer Ceramic Capacitors MLCC - SMD/SMT ROHS; Manufacturer: FH; Manufacturer Part Number: 0402CG500J500NT; LCSC Part Number: C501830; Item Type: Capacitor; ComponentLink1Description: LCSC; ComponentLink1URL: https://www.lcsc.com/product-detail/Multilayer-Ceramic-Capacitors-MLCC-SMD-SMT_FH-Guangdong-Fenghua-Advanced-Tech-0402CG500J500NT_C501830.html; Value: 50pF
footprint Cap-0402
pins: 1, 2

## 0402F104M500NT
designator C?, comment 100nF
50V 100nF Y5V ±20% 0402 Multilayer Ceramic Capacitors MLCC - SMD/SMT ROHS; Manufacturer: FH; Manufacturer Part Number: 0402F104M500NT; LCSC Part Number: C1581; Value: 100nF; Item Type: Capacitor; ComponentLink1Description: LCSC; ComponentLink1URL: https://lcsc.com/product-detail/Multilayer-Ceramic-Capacitors-MLCC-SMD-SMT_FH-Guangdong-Fenghua-Advanced-Tech-0402F104M500NT_C1581.html
footprint Cap-0402
pins: 1, 2

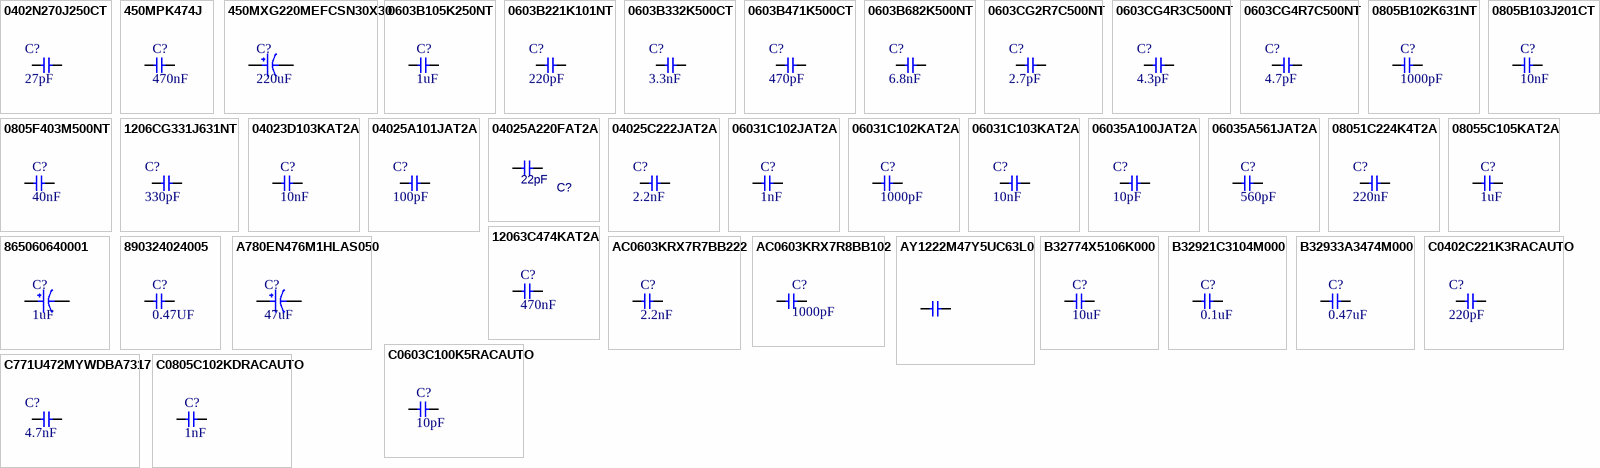
[diagram p1: symbols 0402N270J250CT to C0805C102KDRACAUTO]

## 0402N270J250CT
designator C?, comment 27pF
CAP CER 27PF 25V C0G/NP0 0402; Manufacturer: Walsin Technologies; Manufacturer Part Number: 0402N270J250CT; Item Type: Capacitor; Supplier 1: Digi-Key; Stock 1: 71180; Pricing 1: 1=0.1, 10=0.017, 50=0.0094, 100=0.0076, 500=0.00544, 1000=0.00427, 2500=0.00388, 5000=0.00357 (USD); RoHS Compliant: Yes; Supplier Part Number 1: 1292-1291-1-ND; LCSC Part Number: C424826; ComponentLink1Description: LCSC; ComponentLink1URL: https://lcsc.com/product-detail/Multilayer-Ceramic-Capacitors-MLCC-SMD-SMT_Walsin-Tech-Corp-0402N270J250CT_C424826.html
footprint Cap-0402
pins: 1, 2

## 450MPK474J
designator C?, comment 470nF
CAP FILM 0.47UF 5% 450VDC RADIAL; Manufacturer: Rubycon; Manufacturer Part Number: 450MPK474J; Item Type: Film Capacitors; Dielectric Material: Polypropylene; Voltage Rating (DC): 450V; Supplier: Digikey; LCSC Part Number: C2798220; RoHS: Yes; Stock: 4083; Pricing: 1=0.84, 10=0.605, 100=0.4311, 4000=0.26942, 8000=0.25962, 12000=0.25531 (USD); Mounting Technology: Through Hole; Case/Package: Radial; Min Operating Temperature: -40°C; Max Operating Temperature: 105°C; Package Quantity: 1; Value: 470nF; Tolerance: 5%; Packaging: Cut Tape; Termination: PC Pins; Series: MPK; Length: 0.709inch; Width: 0.256inch; Height - Seated (Max): 0.433inch; Lead Pitch: 0.591inch; RoHS Compliant: Yes; ComponentLink1URL: https://datasheet.ciiva.com/6281/e-mpk-6281321.pdf?src-supplier=Digikey; ComponentLink1Description: https://datasheet.ciiva.com/6281/e-mpk-6281321.pdf?src-supplier=Digikey; ComponentLink2URL: https://datasheet.ciiva.com/15021/e-mpk-15021932.pdf?src-supplier=Digikey; ComponentLink2Description: https://datasheet.ciiva.com/15021/e-mpk-15021932.pdf?src-supplier=Digikey
footprint 450MPK474J
pins: 1, 2

## 450MXG220MEFCSN30X30
designator C?, comment 220uF
20% 1.35A@120Hz 10mm 450V 220uF Plugin,D30xL30mm Horn-Type Electrolytic Capacitors ROHS; Manufacturer: Rubycon; Manufacturer Part Number: 450MXG220MEFCSN30X30; Supplier: Digikey; LCSC Part Number: C239291; RoHS: Yes; Item Type: Capacitors; Stock: 139; Pricing: 1=5.02, 10=3.385, 50=2.7274, 100=2.7166 (USD); ComponentLink1URL: https://datasheet.ciiva.com/6300/e-mxg-6300988.pdf?src-supplier=Digikey; ComponentLink1Description: https://datasheet.ciiva.com/6300/e-mxg-6300988.pdf?src-supplier=Digikey
footprint 450MXG220MEFCSN30X30
pins: 1, 2

## 0603B105K250NT
designator C?, comment 1uF
25V 1uF X7R ±10% 0603 Multilayer Ceramic Capacitors MLCC - SMD/SMT ROHS; Manufacturer: FH; Manufacturer Part Number: 0603B105K250NT; Package: 0603; LCSC Part Number: C59302; Item Type: Capacitor; ComponentLink1Description: LCSC; ComponentLink1URL: https://www.lcsc.com/product-detail/Multilayer-Ceramic-Capacitors-MLCC-SMD-SMT_FH-Guangdong-Fenghua-Advanced-Tech-0603B105K250NT_C59302.html
footprint Cap-0603
pins: 1, 2

## 0603B221K101NT
designator C?, comment 220pF
100V 220pF X7R ±10% 0603 Multilayer Ceramic Capacitors MLCC - SMD/SMT ROHS; Manufacturer: FH; Manufacturer Part Number: 0603B221K101NT; Package: 0603; LCSC Part Number: C313082; Item type: Capacitor; ComponentLink1Description: LCSC; ComponentLink1URL: https://www.lcsc.com/product-detail/Multilayer-Ceramic-Capacitors-MLCC-SMD-SMT_FH-Guangdong-Fenghua-Advanced-Tech-0603B221K101NT_C313082.html
footprint Cap-0603
pins: 1, 2

## 0603B332K500CT
designator C?, comment 3.3nF
MLCC 3.3nF 50V X7R 0603; Manufacturer: Walsin Technologies; Manufacturer Part Number: 0603B332K500CT; Tolerance: 10%; Item Type: Capacitor; Supplier 1: Arrow Electronics; RoHS: Yes; Category: Ceramic Capacitors; Stock 1: 88000; Pricing 1: 4000=0.00570, 12000=0.00560 (USD); Case/Package: Ceramic; Case Code (Metric): 1608; Case Code (Imperial): 0603; Min Operating Temperature: -55°C; Max Operating Temperature: 125°C; Packaging: Tape and Reel; Capacitance: 3.3nF; Dielectric: X7R; Voltage Rating: 50V; Voltage Rating (DC): 50V; Length: 1.6mm; Depth: 0.8mm; Radiation Hardening: No; RoHS Compliant: Yes; REACH SVHC: Unknown; Lead Free: Lead Free; ComponentLink1URL: https://datasheet.ciiva.com/26864/getdatasheetpartid-414329-26864536.pdf?src-supplier=Verical; ComponentLink1Description: https://datasheet.ciiva.com/26864/getdatasheetpartid-414329-26864536.pdf?src-supplier=Verical; Supplier Part Number 1: 0603B332K500CT; LCSC Part Number: C302028
footprint Cap-0603
pins: 1, 2

## 0603B471K500CT
designator C?, comment 470pF
CAP CER 470PF 50V X7R 0603; Manufacturer: Walsin Technologies; Manufacturer Part Number: 0603B471K500CT; Tolerance: 10%; Item Type: Capacitor; Supplier 1: Arrow Electronics; RoHS: Yes; Category: Ceramic Capacitors; Stock 1: 136000; Pricing 1: 4000=0.00550, 8000=0.00460, 12000=0.00440, 40000=0.00430 (USD); Case/Package: Ceramic; Case Code (Metric): 1608; Case Code (Imperial): 0603; Min Operating Temperature: -55°C; Max Operating Temperature: 125°C; Capacitance: 470pF; Packaging: Tape and Reel; Dielectric: X7R; Voltage Rating: 50V; Voltage Rating (DC): 50V; Length: 1.6mm; Depth: 0.8mm; Radiation Hardening: No; RoHS Compliant: Yes; REACH SVHC: Unknown; Lead Free: Lead Free; ComponentLink1URL: https://www.verical.com/server-webapp/html/getDatasheet?partID=467798&src-supplier=Verical; ComponentLink1Description: https://www.verical.com/server-webapp/html/getDatasheet?partID=467798&src-supplier=Verical; ComponentLink2URL: http://www.farnell.com/datasheets/2340522.pdf?src-supplier=Farnell; ComponentLink2Description: http://www.farnell.com/datasheets/2340522.pdf?src-supplier=Farnell; ComponentLink3URL: http://www.passivecomponent.com/indexsea/0603B471K500CT-IS.pdf?src-supplier=Digi-Key; ComponentLink3Description: http://www.passivecomponent.com/indexsea/0603B471K500CT-IS.pdf?src-supplier=Digi-Key; ComponentLink4URL: http://www.passivecomponent.com/wp-content/uploads/2018/10/MLCC.pdf?src-supplier=Digi-Key; ComponentLink4Description: http://www.passivecomponent.com/wp-content/uploads/2018/10/MLCC.pdf?src-supplier=Digi-Key; ComponentLink5URL: http://www.farnell.com/datasheets/1958513.pdf?src-supplier=Element14; ComponentLink5Description: http://www.farnell.com/datasheets/1958513.pdf?src-supplier=Element14; ComponentLink6URL: http://www.farnell.com/datasheets/2340522.pdf?src-supplier=Newark; ComponentLink6Description: http://www.farnell.com/datasheets/2340522.pdf?src-supplier=Newark; Supplier Part Number 1: 0603B471K500CT; LCSC Part Number: C93192
footprint Cap-0603
pins: 1, 2

## 0603B682K500NT
designator C?, comment 6.8nF
50V 6.8nF X7R ±10% 0603; Manufacturer: FH; Manufacturer Part Number: 0603B682K500NT; Item Type: Capacitor; ComponentLink1Description: LCSC; ComponentLink1URL: https://www.lcsc.com/product-detail/Multilayer-Ceramic-Capacitors-MLCC-SMD-SMT_FH-Guangdong-Fenghua-Advanced-Tech-0603B682K500NT_C1631.html; Footprint: 0603; Value: 6.8nF; LCSC Part Number: C1631
footprint Cap-0603
pins: 1, 2

## 0603CG2R7C500NT
designator C?, comment 2.7pF
50V 2.7pF C0G ±0.25pF 0603 MLCC - SMD/SMT ROHS; Manufacturer: FH; Manufacturer Part Number: 0603CG2R7C500NT; Item Type: Capacitor; Footprint: 0603; ComponentLink1Description: LCSC; ComponentLink1URL: https://lcsc.com/product-detail/Multilayer-Ceramic-Capacitors-MLCC-SMD-SMT_FH-Guangdong-Fenghua-Advanced-Tech-0603CG2R7C500NT_C95180.html; Value: 2.7pF
footprint Cap-0603
pins: 1, 2

## 0603CG4R3C500NT
designator C?, comment 4.3pF
50V 4.3pF C0G 0603 Multilayer Ceramic Capacitors MLCC - SMD/SMT ROHS; Manufacturer: FH; Manufacturer Part Number: 0603CG4R3C500NT; Package: 0603; LCSC Part Number: C59526; Item Type: Capacitor; ComponentLink1Description: LCSC; ComponentLink1URL: https://www.lcsc.com/product-detail/Multilayer-Ceramic-Capacitors-MLCC-SMD-SMT_FH-Guangdong-Fenghua-Advanced-Tech-0603CG4R3C500NT_C59526.html
footprint Cap-0603
pins: 1, 2

## 0603CG4R7C500NT
designator C?, comment 4.7pF
50V 4.7pF C0G ±0.25pF 0603 MLCC - SMD/SMT ROHS; Manufacturer: FH; Manufacturer Part Number: 0603CG4R7C500NT; Item Type: Capacitor; Footprint: 0603; ComponentLink1Description: LCSC; ComponentLink1URL: https://lcsc.com/product-detail/Multilayer-Ceramic-Capacitors-MLCC-SMD-SMT_FH-Guangdong-Fenghua-Advanced-Tech-0603CG4R7C500NT_C1669.html; Value: 4.7pF; LCSC Part Number: C1669
footprint Cap-0603
pins: 1, 2

## 0805B102K631NT
designator C?, comment 1000pF
630V 1000pF X7R ±10% 0805 Multilayer Ceramic Capacitors MLCC - SMD/SMT ROHS; Manufacturer: FH (Guangdong Fenghua Advanced Tech); Manufacturer Part Number: 0805B102K631NT; Package: 0805; LCSC Part Number: C20617885; Item Type: Capacitor; ComponentLink1Description: LCSC; ComponentLink1URL: https://www.lcsc.com/product-detail/Multilayer-Ceramic-Capacitors-MLCC-SMD-SMT_FH-Guangdong-Fenghua-Advanced-Tech-0805B102K631NT_C20617885.html?s_z=n_%2520C0805C102JBRACTU
footprint Cap-0805 (SMD 0805)
pins: 1, 2

## 0805B103J201CT
designator C?, comment 10nF
CAP CER 10000PF 200V X7R 0805; Manufacturer: Walsin Technology Corporation; Manufacturer Part Number: 0805B103J201CT; Item Type: Capacitor; Package: 0805; LCSC Part Number: C5122275; ComponentLink1Description: LCSC; ComponentLink1URL: https://www.lcsc.com/product-detail/Multilayer-Ceramic-Capacitors-MLCC-SMD-SMT_Walsin-Tech-Corp-0805B103J201CT_C5122275.html
footprint Cap-0805 (SMD 0805)
pins: 1, 2

## 0805F403M500NT
designator C?, comment 40nF
50V 40nF Y5V ±20% 0805 Multilayer Ceramic Capacitors MLCC - SMD/SMT ROHS; Manufacturer: FH (Guangdong Fenghua Advanced Tech); Manufacturer Part Number: 0805F403M500NT; Package: 0805; LCSC Part Number: C502151; Item Type: Capacitor; ComponentLink1Description: LCSC; ComponentLink1URL: https://www.lcsc.com/product-detail/Multilayer-Ceramic-Capacitors-MLCC-SMD-SMT_FH-Guangdong-Fenghua-Advanced-Tech-0805F403M500NT_C502151.html
footprint Cap-0805 (SMD 0805)
pins: 1, 2

## 1206CG331J631NT
designator C?, comment 330pF
630V 330pF C0G ±5% 1206 Multilayer Ceramic Capacitors MLCC - SMD/SMT ROHS; Manufacturer: FH (Guangdong Fenghua Advanced Tech); Manufacturer Part Number: 1206CG331J631NT; Package: 1206; LCSC Part Number: C2961287; Item Type: Capacitor; ComponentLink1Description: LCSC; ComponentLink1URL: https://www.lcsc.com/product-detail/Multilayer-Ceramic-Capacitors-MLCC-SMD-SMT_FH-Guangdong-Fenghua-Advanced-Tech-1206CG331J631NT_C2961287.html?s_z=n_%2520GRM31A5C2J331JW01D
footprint Cap-1206 (SMD 1206)
pins: 1, 2